# Altium schematic symbol library FC-13532P7680KA-A5.SchLib: 1 symbol
Pins are listed as number, name and electrical type; pins without a type are passive.

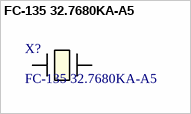
[diagram p0: symbol FC-135 32.7680KA-A5]

## FC-135 32.7680KA-A5
designator X?
Description; Manufacturer_Name: Epson; Copyright: Copyright (C) 2025 Ultra Librarian. All rights reserved.; Manufacturer_Part_Number: FC-135 32.7680KA-A5
footprint XTAL_FC-135_EPS
pins: 1, 2